# Altium footprint library Zlacze_ARK.PcbLib: 1 footprints
Each footprint in its own frame and in the unit in brackets; x right, y up, seen from the top. Pads: shape width x height; smd on the part's side, far side on the other; paste and mask are expansions set on the pad; w line width, h text height; cw(c..) or ccw(c..) is an arc to the next point about the centre after c.
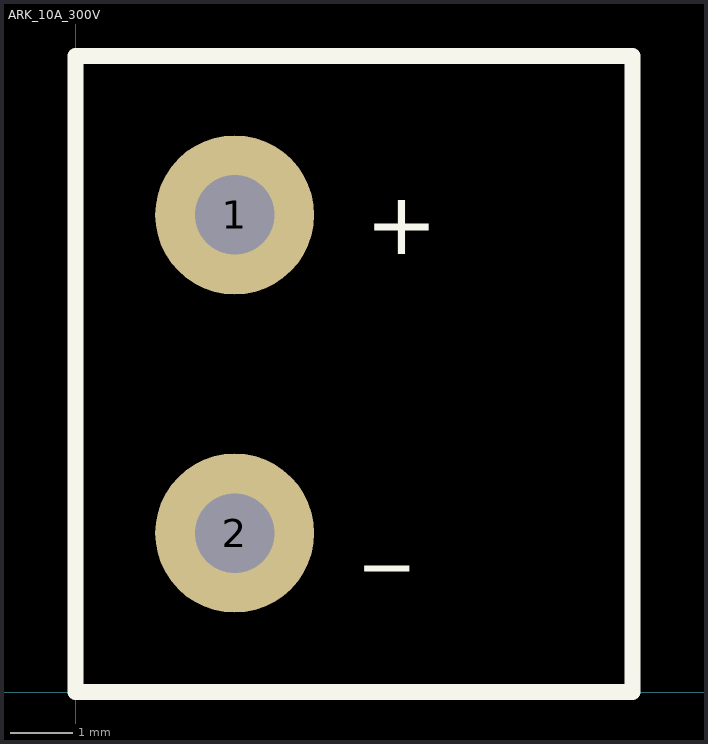
[diagram p0: the footprint, top view; thin cyan lines are the x and y axes]

## ARK_10A_300V [mil]
pads (2):
  round 100 hole 50: 1(100,300) 2(100,100)
Top Overlay:
  lines w10: 0,0 0,400 350,400 350,0 0,0
  text "+" at 182,275.34 h40
  text "_" at 182,88.66 h40